# Altium schematic symbol library Components - 05.10.26 - 18.00.SchLib: 1 symbol
Pins are listed as number, name and electrical type; pins without a type are passive.

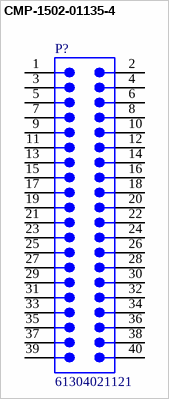
[diagram p0: symbol CMP-1502-01135-4]

## CMP-1502-01135-4
designator P?, comment 61304021121
WR-PHD Straight Male, PCB Header, Through Hole, 2 Rows, 40 Contacts, 2.54mm Pitch; Number of Positions: 40; Contact Resistance: 20mΩ; Connector Type: Male Pin; Voltage Rating: 250V; Current Rating: 3A; Color: Black; Number of Pins: 40; Orientation: Vertical; Number of Rows: 2; Number of Contacts: 40; Gender: Male; Contact Plating: Gold; Pitch: 2.54mm; Contact Material: Gold; RoHS: Compliant; Min Operating Temperature: -40°C; Operating Supply Voltage: 250V; Row Spacing: 2.54mm; Contact Mating Length: 5.9944mm; Packaging: Bulk; Lead Pitch: 2.54mm; Height: 8.89mm; Max Operating Temperature: 105°C; Mount: Through Hole; Termination: Solder
footprint 61304021121 (Pin Header, pitch 2.54 mm, THT, Vertical, dual row, 40p)
pins: 1, 2, 3, 4, 5, 6, 7, 8, 9, 10, 11, 12, 13, 14, 15, 16, 17, 18, 19, 20, 21, 22, 23, 24, 25, 26, 27, 28, 29, 30, 31, 32, 33, 34, 35, 36, 37, 38, 39, 40